# Altium integrated library WH148-1A-2-18T-L20.IntLib: 1 symbol
Pins are listed as number, name and electrical type; pins without a type are passive.

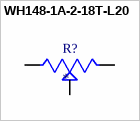
[diagram p0: symbol WH148-1A-2-18T-L20]

## WH148-1A-2-18T-L20
designator R?
16mm Rotary Potentiometers; MF: Kls electronics; MP: WH148-1A-2-18T-L20; SnapEDA_Link: https://www.snapeda.com/parts/WH148-1A-2-18T-L20/Kls+electronics/view-part/?ref=snap; Package: Package; Value: *; Check_prices: https://www.snapeda.com/parts/WH148-1A-2-18T-L20/Kls+electronics/view-part/?ref=eda
footprint TRIM_WH148-1A-2-18T-L20
pins: 1, 2, 3